# Altium footprint library WE-CMANC.PcbLib: 29 footprints (part 1 of 2)
Each footprint in its own frame and in the unit in brackets; x right, y up, seen from the top. Pads: shape width x height; smd on the part's side, far side on the other; paste and mask are expansions set on the pad; w line width, h text height; cw(c..) or ccw(c..) is an arc to the next point about the centre after c.
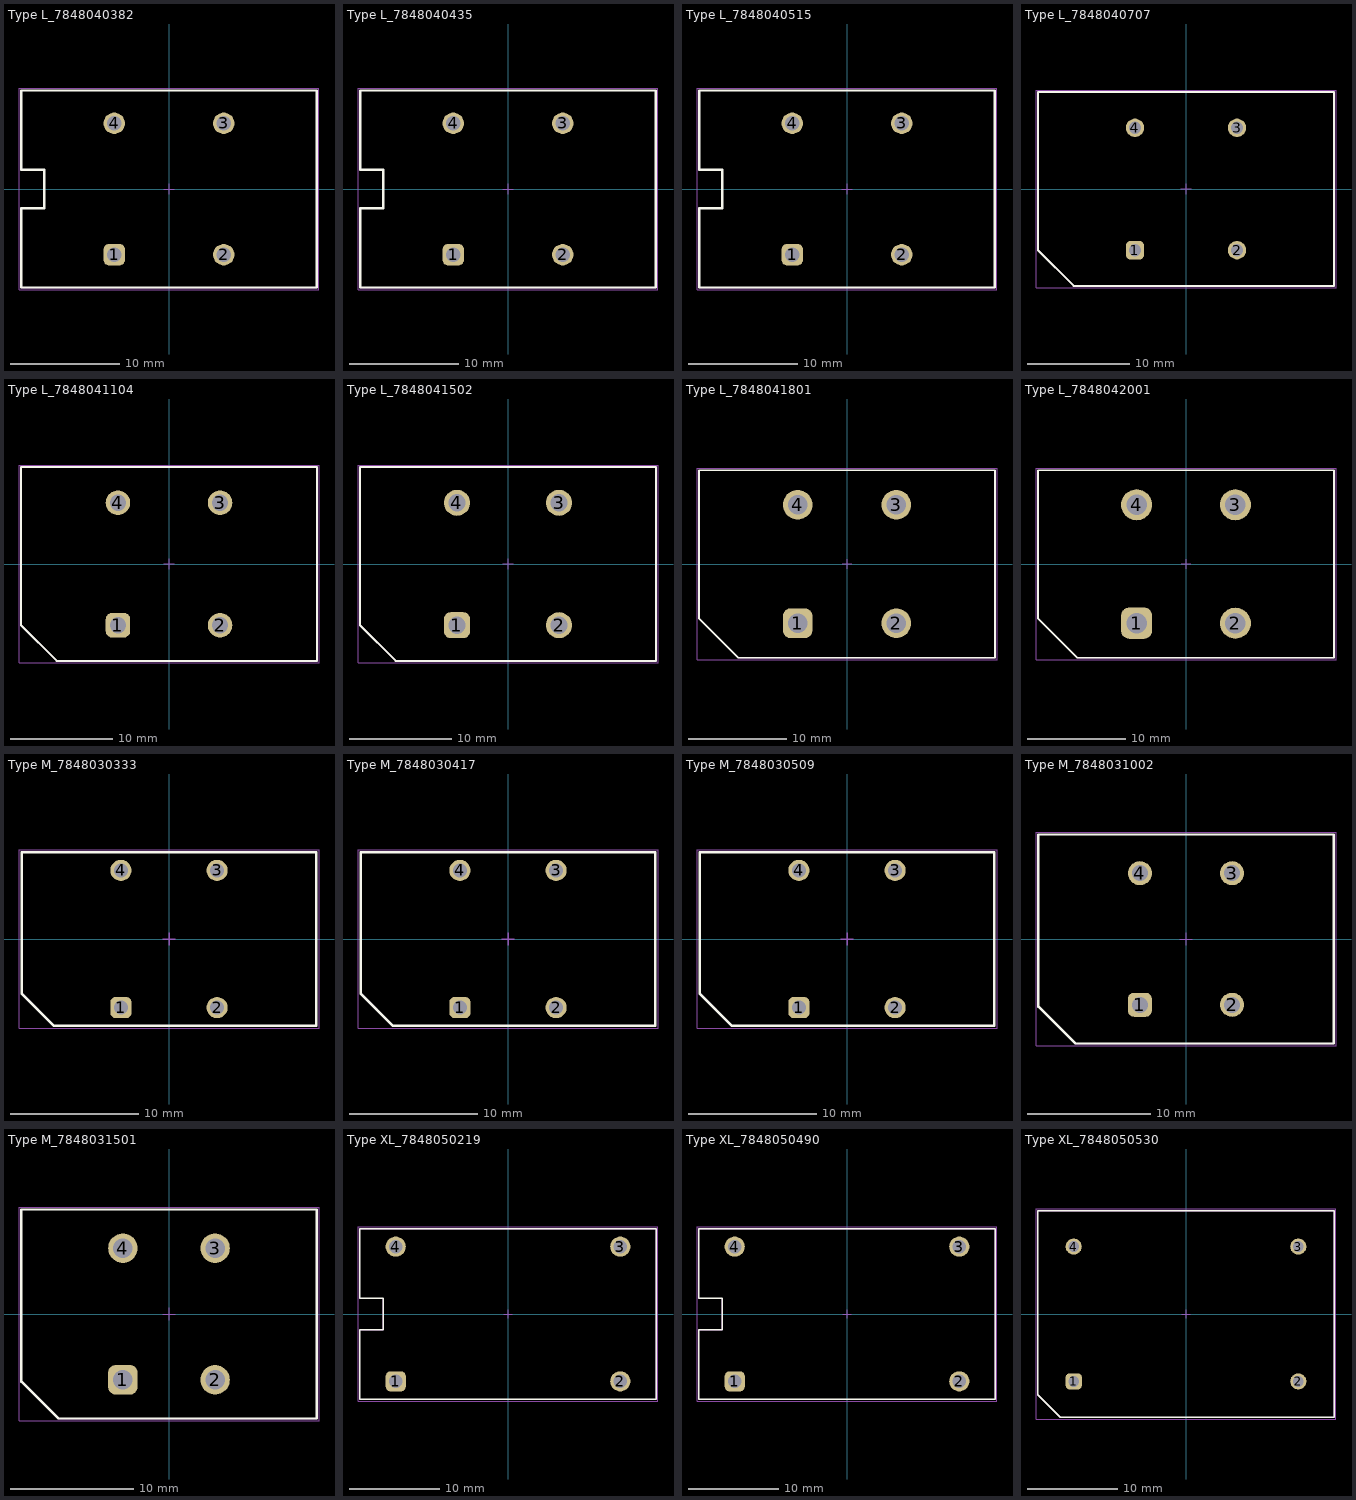
[diagram p0: the footprints below, top view; thin cyan lines are the x and y axes]

## Type L_7848040382 [mm] "THT Common Mode Power Line Choke, 4 leads"
height 32
pads (4):
  rrect50% 1.95x1.95 hole 1.3: 1(-5,-6)
  round 1.95 hole 1.3: 2(5,-6) 3(5,6) 4(-5,6)
Top Overlay:
  lines w0.2: -13.5,-9 -13.5,-1.75 -11.4,-1.75 -11.4,1.75 -13.5,1.75 -13.5,9 13.5,9 13.5,-9 -13.5,-9
Top Assembly:
  lines w0.1: -13.5,-9 -13.5,-1.75 -11.4,-1.75 -11.4,1.75 -13.5,1.75 -13.5,9 13.5,9 13.5,-9 -13.5,-9
Top Designator:
  text ".Designator" at -3.647,-0.357 h1
Top 3D Body:
  lines w0.1: -13.5,-9 -13.5,-1.75 -11.4,-1.75 -11.4,1.75 -13.5,1.75 -13.5,9 13.5,9 13.5,-9 -13.5,-9
Top Courtyard:
  lines w0.05: -13.7,-9.2 13.7,-9.2 13.7,9.2 -13.7,9.2 -13.7,-9.2
Top Component Center:
  lines w0.1: -0.5,0 0.5,0 ; 0,-0.5 0,0.5
3D body "7448040382.stp": height 29.74, standoff -5.02, extent -12.502,-8.55 12.702,8.45

## Type L_7848040435 [mm] "THT Common Mode Power Line Choke, 4 leads"
height 32
pads (4):
  rrect50% 1.95x1.95 hole 1.3: 1(-5,-6)
  round 1.95 hole 1.3: 2(5,-6) 3(5,6) 4(-5,6)
Top Overlay:
  lines w0.2: -13.5,-9 -13.5,-1.75 -11.4,-1.75 -11.4,1.75 -13.5,1.75 -13.5,9 13.5,9 13.5,-9 -13.5,-9
Top Assembly:
  lines w0.1: -13.5,-9 -13.5,-1.75 -11.4,-1.75 -11.4,1.75 -13.5,1.75 -13.5,9 13.5,9 13.5,-9 -13.5,-9
Top Designator:
  text ".Designator" at -3.647,-0.357 h1
Top 3D Body:
  lines w0.1: -13.5,-9 -13.5,-1.75 -11.4,-1.75 -11.4,1.75 -13.5,1.75 -13.5,9 13.5,9 13.5,-9 -13.5,-9
Top Courtyard:
  lines w0.05: -13.7,-9.2 13.7,-9.2 13.7,9.2 -13.7,9.2 -13.7,-9.2
Top Component Center:
  lines w0.1: -0.5,0 0.5,0 ; 0,-0.5 0,0.5
3D body "7448040435.stp": height 29.74, standoff -5.02, extent -12.747,-8.55 12.947,8.45

## Type L_7848040515 [mm] "THT Common Mode Power Line Choke, 4 leads"
height 32
pads (4):
  rrect50% 1.95x1.95 hole 1.3: 1(-5,-6)
  round 1.95 hole 1.3: 2(5,-6) 3(5,6) 4(-5,6)
Top Overlay:
  lines w0.2: -13.5,-9 -13.5,-1.75 -11.4,-1.75 -11.4,1.75 -13.5,1.75 -13.5,9 13.5,9 13.5,-9 -13.5,-9
Top Assembly:
  lines w0.1: -13.5,-9 -13.5,-1.75 -11.4,-1.75 -11.4,1.75 -13.5,1.75 -13.5,9 13.5,9 13.5,-9 -13.5,-9
Top Designator:
  text ".Designator" at -3.647,-0.357 h1
Top 3D Body:
  lines w0.1: -13.5,-9 -13.5,-1.75 -11.4,-1.75 -11.4,1.75 -13.5,1.75 -13.5,9 13.5,9 13.5,-9 -13.5,-9
Top Courtyard:
  lines w0.05: -13.7,-9.2 13.7,-9.2 13.7,9.2 -13.7,9.2 -13.7,-9.2
Top Component Center:
  lines w0.1: -0.5,0 0.5,0 ; 0,-0.5 0,0.5
3D body "7448040515.stp": height 29.74, standoff -5.05, extent -12.97,-8.55 13.17,8.45

## Type L_7848040707 [mm] "THT Common Mode Power Line Choke, 4 leads, body 28x19mm"
height 28
pads (4):
  rrect50% 1.8x1.8 hole 1.2: 1(-5,-6)
  round 1.8 hole 1.2: 2(5,-6) 3(5,6) 4(-5,6)
Top Overlay:
  lines w0.2: -14.5,-6 -11,-9.5 14.5,-9.5 14.5,9.5 -14.5,9.5 -14.5,-6
Top Assembly:
  lines w0.1: -14.5,-6 -14.5,9.5 14.5,9.5 14.5,-9.5 -11,-9.5 -14.5,-6
Top Designator:
  text ".Designator" at -3.647,-0.357 h1
Top 3D Body:
  lines w0.1: -14.5,-6 -14.5,9.5 14.5,9.5 14.5,-9.5 -11,-9.5 -14.5,-6
Top Courtyard:
  lines w0.05: -14.7,-9.7 -14.7,9.7 14.7,9.7 14.7,-9.7 -14.7,-9.7
Top Component Center:
  lines w0.1: -0.5,0 0.5,0 ; 0,-0.5 0,0.5
3D body "7448040707.stp": height 25.64, standoff -4.75, extent -13.65,-9.05 13.85,8.95

## Type L_7848041104 [mm] "THT Common Mode Power Line Choke, 4 leads, body 28x19mm"
height 28
pads (4):
  rrect50% 2.4x2.4 hole 1.6: 1(-5,-6)
  round 2.4 hole 1.6: 2(5,-6) 3(5,6) 4(-5,6)
Top Overlay:
  lines w0.2: -14.5,-6 -11,-9.5 14.5,-9.5 14.5,9.5 -14.5,9.5 -14.5,-6
Top Assembly:
  lines w0.1: -14.5,-6 -14.5,9.5 14.5,9.5 14.5,-9.5 -11,-9.5 -14.5,-6
Top Designator:
  text ".Designator" at -3.647,-0.357 h1
Top 3D Body:
  lines w0.1: -14.5,-6 -14.5,9.5 14.5,9.5 14.5,-9.5 -11,-9.5 -14.5,-6
Top Courtyard:
  lines w0.05: -14.7,-9.7 -14.7,9.7 14.7,9.7 14.7,-9.7 -14.7,-9.7
Top Component Center:
  lines w0.1: -0.5,0 0.5,0 ; 0,-0.5 0,0.5
3D body "7448041104.stp": height 25.64, standoff -4.75, extent -13.65,-9.05 13.85,8.95

## Type L_7848041502 [mm] "THT Common Mode Power Line Choke, 4 leads, body 30x19mm"
height 28
pads (4):
  rrect50% 2.55x2.55 hole 1.7: 1(-5,-6)
  round 2.55 hole 1.7: 2(5,-6) 3(5,6) 4(-5,6)
Top Overlay:
  lines w0.2: -14.5,-6 -11,-9.5 14.5,-9.5 14.5,9.5 -14.5,9.5 -14.5,-6
Top Assembly:
  lines w0.1: -14.5,-6 -14.5,9.5 14.5,9.5 14.5,-9.5 -11,-9.5 -14.5,-6
Top Designator:
  text ".Designator" at -3.647,-0.357 h1
Top 3D Body:
  lines w0.1: -14.5,-6 -14.5,9.5 14.5,9.5 14.5,-9.5 -11,-9.5 -14.5,-6
Top Courtyard:
  lines w0.05: -14.7,-9.7 -14.7,9.7 14.7,9.7 14.7,-9.7 -14.7,-9.7
Top Component Center:
  lines w0.1: -0.5,0 0.5,0 ; 0,-0.5 0,0.5
3D body "7448041502.stp": height 25.64, standoff -4.75, extent -13.65,-9.05 13.85,8.95

## Type L_7848041801 [mm] "THT Common Mode Power Line Choke, 4 leads, body 30x19mm"
height 28
pads (4):
  rrect50% 3x3 hole 2: 1(-5,-6)
  round 3 hole 2: 2(5,-6) 3(5,6) 4(-5,6)
Top Overlay:
  lines w0.2: -15,-5.5 -15,9.5 15,9.5 15,-9.5 -11,-9.5 -15,-5.5
Top Assembly:
  lines w0.1: -15,-5.5 -11,-9.5 15,-9.5 15,9.5 -15,9.5 -15,-5.5
Top Designator:
  text ".Designator" at -3.647,-0.357 h1
Top 3D Body:
  lines w0.1: -15,-5.5 -11,-9.5 15,-9.5 15,9.5 -15,9.5 -15,-5.5
Top Courtyard:
  lines w0.05: -15.2,-9.7 15.2,-9.7 15.2,9.7 -15.2,9.7 -15.2,-9.7
Top Component Center:
  lines w0.1: -0.5,0 0.5,0 ; 0,-0.5 0,0.5
3D body "7448041801.stp": height 25.64, standoff -4.75, extent -13.65,-9.05 13.85,8.95

## Type L_7848042001 [mm] "THT Common Mode Power Line Choke, 4 leads, body 30x19mm"
height 28
pads (4):
  rrect50% 3.15x3.15 hole 2.1: 1(-5,-6)
  round 3.15 hole 2.1: 2(5,-6) 3(5,6) 4(-5,6)
Top Overlay:
  lines w0.2: -15,-5.5 -15,9.5 15,9.5 15,-9.5 -11,-9.5 -15,-5.5
Top Assembly:
  lines w0.1: -15,-5.5 -11,-9.5 15,-9.5 15,9.5 -15,9.5 -15,-5.5
Top Designator:
  text ".Designator" at -3.647,-0.357 h1
Top 3D Body:
  lines w0.1: -15,-5.5 -11,-9.5 15,-9.5 15,9.5 -15,9.5 -15,-5.5
Top Courtyard:
  lines w0.05: -15.2,-9.7 15.2,-9.7 15.2,9.7 -15.2,9.7 -15.2,-9.7
Top Component Center:
  lines w0.1: -0.5,0 0.5,0 ; 0,-0.5 0,0.5
3D body "7448042001.stp": height 25.64, standoff -4.75, extent -13.65,-9.05 13.85,8.95

## Type M_7848030333 [mm] "THT Common Mode Power Line Choke, 4 leads, body 23x13.5mm"
height 26
pads (4):
  rrect50% 1.65x1.65 hole 1.1: 1(-3.75,-5.35)
  round 1.65 hole 1.1: 2(3.75,-5.35) 3(3.75,5.35) 4(-3.75,5.35)
Top Overlay:
  lines w0.2: -11.5,-4.25 -11.5,6.75 11.5,6.75 11.5,-6.75 -9,-6.75 -11.5,-4.25
Top Assembly:
  lines w0.1: -11.5,-4.25 -9,-6.75 11.5,-6.75 11.5,6.75 -11.5,6.75 -11.5,-4.25
Top Designator:
  text ".Designator" at -3.647,-0.357 h1
Top 3D Body:
  lines w0.1: -11.5,-4.25 -9,-6.75 11.5,-6.75 11.5,6.75 -11.5,6.75 -11.5,-4.25
Top Courtyard:
  lines w0.05: -11.7,-6.95 -11.7,6.95 11.7,6.95 11.7,-6.95 -11.7,-6.95
Top Component Center:
  lines w0.1: -0.5,0 0.5,0 ; 0,-0.5 0,0.5
3D body "7448030333.stp": height 24.55, standoff -4.9, extent -10.88,-6.5 10.88,6.5

## Type M_7848030417 [mm] "THT Common Mode Power Line Choke, 4 leads, body 23x13.5mm"
height 26
pads (4):
  rrect50% 1.65x1.65 hole 1.1: 1(-3.75,-5.35)
  round 1.65 hole 1.1: 2(3.75,-5.35) 3(3.75,5.35) 4(-3.75,5.35)
Top Overlay:
  lines w0.2: -11.5,-4.25 -11.5,6.75 11.5,6.75 11.5,-6.75 -9,-6.75 -11.5,-4.25
Top Assembly:
  lines w0.1: -11.5,-4.25 -9,-6.75 11.5,-6.75 11.5,6.75 -11.5,6.75 -11.5,-4.25
Top Designator:
  text ".Designator" at -3.647,-0.357 h1
Top 3D Body:
  lines w0.1: -11.5,-4.25 -9,-6.75 11.5,-6.75 11.5,6.75 -11.5,6.75 -11.5,-4.25
Top Courtyard:
  lines w0.05: -11.7,-6.95 -11.7,6.95 11.7,6.95 11.7,-6.95 -11.7,-6.95
Top Component Center:
  lines w0.1: -0.5,0 0.5,0 ; 0,-0.5 0,0.5
3D body "7448030417.stp": height 24.55, standoff -4.9, extent -11.056,-6.502 11.056,6.5

## Type M_7848030509 [mm] "THT Common Mode Power Line Choke, 4 leads, body 22x13.5mm"
height 25
pads (4):
  rrect50% 1.65x1.65 hole 1.1: 1(-3.75,-5.35)
  round 1.65 hole 1.1: 2(3.75,-5.35) 3(3.75,5.35) 4(-3.75,5.35)
Top Overlay:
  lines w0.2: -11.5,-4.25 -11.5,6.75 11.5,6.75 11.5,-6.75 -9,-6.75 -11.5,-4.25
Top Assembly:
  lines w0.1: -11.5,-4.25 -9,-6.75 11.5,-6.75 11.5,6.75 -11.5,6.75 -11.5,-4.25
Top Designator:
  text ".Designator" at -3.647,-0.357 h1
Top 3D Body:
  lines w0.1: -11.5,-4.25 -9,-6.75 11.5,-6.75 11.5,6.75 -11.5,6.75 -11.5,-4.25
Top Courtyard:
  lines w0.05: -11.7,-6.95 -11.7,6.95 11.7,6.95 11.7,-6.95 -11.7,-6.95
Top Component Center:
  lines w0.1: -0.5,0 0.5,0 ; 0,-0.5 0,0.5
3D body "7448030509.stp": height 24.55, standoff -4.9, extent -11.462,-6.64 11.462,6.781

## Type M_7848031002 [mm] "THT Common Mode Power Line Choke, 4 leads, body 23x17mm"
height 25
pads (4):
  rrect50% 1.95x1.95 hole 1.3: 1(-3.75,-5.35)
  round 1.95 hole 1.3: 2(3.75,-5.35) 3(3.75,5.35) 4(-3.75,5.35)
Top Overlay:
  lines w0.2: -12,-5.5 -9,-8.5 12,-8.5 12,8.5 -12,8.5 -12,-5.5
Top Assembly:
  lines w0.1: -12,-5.5 -9,-8.5 12,-8.5 12,8.5 -12,8.5 -12,-5.5
Top Designator:
  text ".Designator" at -3.647,-0.357 h1
Top 3D Body:
  lines w0.1: -12,-5.5 -9,-8.5 12,-8.5 12,8.5 -12,8.5 -12,-5.5
Top Courtyard:
  lines w0.05: -12.2,-8.7 12.2,-8.7 12.2,8.7 -12.2,8.7 -12.2,-8.7
Top Component Center:
  lines w0.1: -0.5,0 0.5,0 ; 0,-0.5 0,0.5
3D body "7448031002.stp": height 21.55, standoff -4.9, extent -10.74,-7.5 10.739,7.5

## Type M_7848031501 [mm] "THT Common Mode Power Line Choke, 4 leads, body 23x17mm"
height 25
pads (4):
  rrect50% 2.4x2.4 hole 1.6: 1(-3.75,-5.35)
  round 2.4 hole 1.6: 2(3.75,-5.35) 3(3.75,5.35) 4(-3.75,5.35)
Top Overlay:
  lines w0.2: -12,-5.5 -9,-8.5 12,-8.5 12,8.5 -12,8.5 -12,-5.5
Top Assembly:
  lines w0.1: -12,-5.5 -9,-8.5 12,-8.5 12,8.5 -12,8.5 -12,-5.5
Top Designator:
  text ".Designator" at -3.647,-0.357 h1
Top 3D Body:
  lines w0.1: -12,-5.5 -9,-8.5 12,-8.5 12,8.5 -12,8.5 -12,-5.5
Top Courtyard:
  lines w0.05: -12.2,-8.7 12.2,-8.7 12.2,8.7 -12.2,8.7 -12.2,-8.7
Top Component Center:
  lines w0.1: -0.5,0 0.5,0 ; 0,-0.5 0,0.5
3D body "7448031501.stp": height 21.55, standoff -4.9, extent -10.875,-7.5 10.874,7.5

## Type XL_7848050219 [mm] "THT Common Mode Power Line Choke, 4 leads, body 33x19mm"
height 39
pads (4):
  rrect50% 2.25x2.25 hole 1.5: 1(-12.5,-7.5)
  round 2.25 hole 1.5: 2(12.5,-7.5) 3(12.5,7.5) 4(-12.5,7.5)
Top Overlay:
  lines w0.2: -16.5,-9.5 -16.5,-1.75 -13.9,-1.75 -13.9,1.75 -16.5,1.75 -16.5,9.5 16.5,9.5 16.5,-9.5 -16.5,-9.5
Top Assembly:
  lines w0.1: -16.5,-9.5 16.5,-9.5 16.5,9.5 -16.5,9.5 -16.5,1.75 -13.9,1.75 -13.9,-1.75 -16.5,-1.75 -16.5,-9.5
Top Designator:
  text ".Designator" at -3.647,-0.357 h1
Top 3D Body:
  lines w0.1: -16.5,-9.5 16.5,-9.5 16.5,9.5 -16.5,9.5 -16.5,1.75 -13.9,1.75 -13.9,-1.75 -16.5,-1.75 -16.5,-9.5
Top Courtyard:
  lines w0.05: -16.7,-9.7 16.7,-9.7 16.7,9.7 -16.7,9.7 -16.7,-9.7
Top Component Center:
  lines w0.1: -0.5,0 0.5,0 ; 0,-0.5 0,0.5
3D body "7448050219.stp": height 35.7, standoff -4.91, extent -15.651,-9.2 15.65,9.2

## Type XL_7848050490 [mm] "THT Common Mode Power Line Choke, 4 leads, body 33x19mm"
height 39
pads (4):
  rrect50% 2.25x2.25 hole 1.5: 1(-12.5,-7.5)
  round 2.25 hole 1.5: 2(12.5,-7.5) 3(12.5,7.5) 4(-12.5,7.5)
Top Overlay:
  lines w0.2: -16.5,-9.5 16.5,-9.5 16.5,9.5 -16.5,9.5 -16.5,1.75 -13.9,1.75 -13.9,-1.75 -16.5,-1.75 -16.5,-9.5
Top Assembly:
  lines w0.1: -16.5,-9.5 -16.5,-1.75 -13.9,-1.75 -13.9,1.75 -16.5,1.75 -16.5,9.5 16.5,9.5 16.5,-9.5 -16.5,-9.5
Top Designator:
  text ".Designator" at -3.647,-0.357 h1
Top 3D Body:
  lines w0.1: -16.5,-9.5 -16.5,-1.75 -13.9,-1.75 -13.9,1.75 -16.5,1.75 -16.5,9.5 16.5,9.5 16.5,-9.5 -16.5,-9.5
Top Courtyard:
  lines w0.05: -16.7,-9.7 -16.7,9.7 16.7,9.7 16.7,-9.7 -16.7,-9.7
Top Component Center:
  lines w0.1: -0.5,0 0.5,0 ; 0,-0.5 0,0.5
3D body "7448050490.stp": height 35.76, standoff -4.9, extent -16.243,-9.676 16.242,9.2

## Type XL_7848050530 [mm] "THT Common Mode Power Line Choke, 4 leads, body 33x23mm"
height 33
pads (4):
  rrect50% 1.8x1.8 hole 1.2: 1(-12.5,-7.5)
  round 1.8 hole 1.2: 2(12.5,-7.5) 3(12.5,7.5) 4(-12.5,7.5)
Top Overlay:
  lines w0.2: -16.5,-9 -14,-11.5 16.5,-11.5 16.5,11.5 -16.5,11.5 -16.5,1.75 -16.5,-1.75 -16.5,-9
Top Assembly:
  lines w0.1: -16.5,-9 -16.5,-1.75 -16.5,1.75 -16.5,11.5 16.5,11.5 16.5,-11.5 -14,-11.5 -16.5,-9
Top Designator:
  text ".Designator" at -3.647,-0.357 h1
Top 3D Body:
  lines w0.1: -16.5,-9 -16.5,-1.75 -16.5,1.75 -16.5,11.5 16.5,11.5 16.5,-11.5 -14,-11.5 -16.5,-9
Top Courtyard:
  lines w0.05: -16.7,-11.7 -16.7,11.7 16.7,11.7 16.7,-11.7 -16.7,-11.7
Top Component Center:
  lines w0.1: -0.5,0 0.5,0 ; 0,-0.5 0,0.5
3D body "7448050530.stp": height 32, standoff -4.9, extent -15.069,-10.3 15.069,10.3